# Altium footprint library huan_basic.PcbLib: 138 footprints (part 3 of 9)
Each footprint in its own frame and in the unit in brackets; x right, y up, seen from the top. Pads: shape width x height; smd on the part's side, far side on the other; paste and mask are expansions set on the pad; w line width, h text height; cw(c..) or ccw(c..) is an arc to the next point about the centre after c.
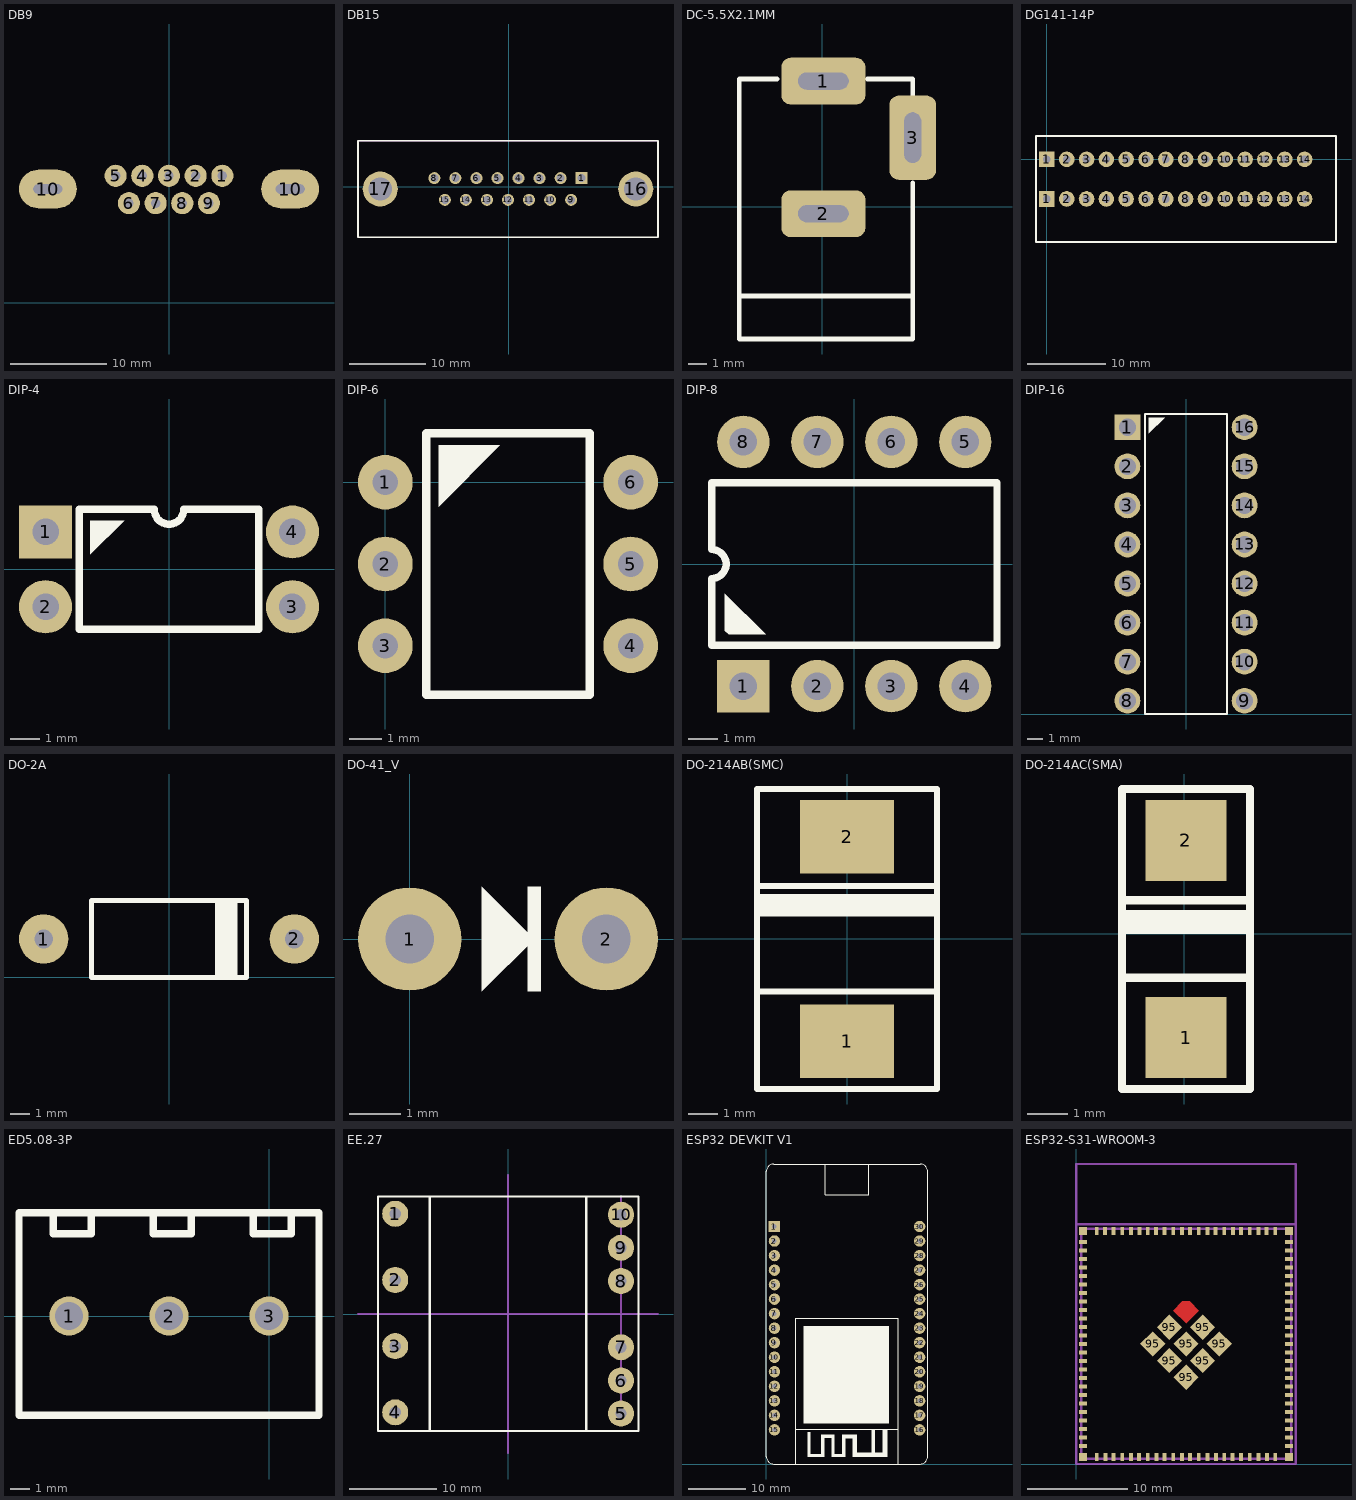
[diagram p2: the footprints below, top view; thin cyan lines are the x and y axes]

## DB9 [mm]
pads (11):
  round 2.3 hole 0.97: 1(5.537,13.183) 2(2.767,13.183) 3(-0.003,13.183) 4(-2.773,13.183) 5(-5.543,13.183) 6(-4.158,10.343) 7(-1.388,10.343) 8(1.382,10.343) 9(4.152,10.343)
  oval 6x4 hole 1 slot 3 at 0 deg: 10(-12.573,11.811) 10(12.573,11.811)
3D body "DB9 - 203-09SCKKBE.STEP": height 12.75, standoff -4.25, extent -15.405,-4.01 15.405,14.54

## DB15 [mm]
pads (17):
  rect 1.56x1.56 hole 1.04: 1(9.525,1.143)
  round 1.56 hole 1.04: 2(6.785,1.143) 3(4.035,1.143) 4(1.295,1.143) 5(-1.445,1.143) 6(-4.185,1.143) 7(-6.935,1.143) 8(-9.675,1.143) 9(8.155,-1.697) 10(5.415,-1.697) 11(2.665,-1.697) 12(-0.075,-1.697) 13(-2.815,-1.697) 14(-5.565,-1.697) 15(-8.305,-1.697)
  round 4.575 hole 3.05: 16(16.585,-0.277) 17(-16.735,-0.277)
Top Overlay:
  lines w0.2: -19.635,-6.552 -19.635,5.998 19.485,5.998 19.485,-6.552 -19.635,-6.552
Mechanical 15:
  lines w0.1: -19.635,-6.552 -19.635,5.998 19.485,5.998 19.485,-6.552 -19.635,-6.552
3D body "DB15_F.STEP": height 12.3, standoff -3.42, extent -19.98,-6.777 20.02,6.223

## DC-5.5X2.1MM [mm]
pads (3):
  rrect40% 4.5x2.5 hole 2.7 slot 0.9 at 90 deg: 1(0.051,6.706) 2(0.051,-0.381)
  rrect40% 2.5x4.5 hole 2.7 slot 0.9 at 0 deg: 3(4.826,3.683)
Top Overlay:
  lines w0.254: -4.447,-4.773 4.826,-4.773 ; -2.413,6.823 -4.447,6.823 -4.447,-7.077 4.826,-7.077 4.826,1.27 ; 2.413,6.823 4.826,6.823 4.826,5.842
3D body "PC-GK2.1--3DModel-STEP-56544.STEP": height 11.1, standoff -2.9, extent -4.447,-7.077 4.953,6.823

## DG141-14P [mm]
pads (28):
  rect 2x2 hole 0.98: 1(0,-5.08) 1(0,0)
  round 2 hole 0.98: 2(2.54,-5.08) 2(2.54,0) 3(5.08,-5.08) 3(5.08,0) 4(7.62,-5.08) 4(7.62,0) 5(10.16,-5.08) 5(10.16,0) 6(12.7,-5.08) 6(12.7,0) 7(15.24,-5.08) 7(15.24,0) 8(17.78,-5.08) 8(17.78,0) 9(20.32,-5.08) 9(20.32,0) 10(22.86,-5.08) 10(22.86,0) 11(25.4,-5.08) 11(25.4,0) 12(27.94,-5.08) 12(27.94,0) 13(30.48,-5.08) 13(30.48,0) 14(33.02,-5.08) 14(33.02,0)
Top Overlay:
  lines w0.254: -1.397,-10.6 37.05,-10.6 37.05,3 -1.397,3 -1.397,-10.6
3D body "DG141R-2.54-10.SLDPRT": height 12.6, standoff -3.5, extent 9.21,-10.63 37.05,2.97
3D body "DG141R-2.54-4.SLDPRT": height 12.6, standoff -3.5, extent -0.9,-10.6 11.7,3

## DIP-4 [mm]
pads (4):
  rect 1.8x1.8 hole 0.9: 1(-4.191,1.27)
  round 1.8 hole 0.9: 2(-4.191,-1.27) 3(4.191,-1.27) 4(4.191,1.27)
Top Overlay:
  region: -2.667,1.651 -1.524,1.651 -2.667,0.508
  lines w0.254: -3.048,-2.032 3.048,-2.032 3.048,2.032 0.5,2.032 cw(c0,2.032) -0.5,2.032 -3.048,2.032 -3.048,-2.032
3D body "pc817 dip6.step": height 4.3, standoff -2.7, extent -3.94,-2.295 3.94,2.295

## DIP-6 [mm]
pads (6):
  round 1.7 hole 0.8: 1(0,0) 2(0,-2.54) 3(0,-5.08) 4(7.62,-5.08) 5(7.62,-2.54) 6(7.62,0)
Top Overlay:
  region: 1.651,1.143 3.556,1.143 1.651,-0.762
  lines w0.254: 1.27,-6.604 6.35,-6.604 6.35,1.524 1.27,1.524 1.27,-6.604
3D body "DIP 6 7_62.stp": height 4, standoff -3.25, extent -0.15,-6.94 7.77,1.86

## DIP-8 [mm]
pads (8):
  rect 1.8x1.8 hole 0.94: 1(-3.81,-4.191)
  round 1.8 hole 0.94: 2(-1.27,-4.191) 3(1.27,-4.191) 4(3.81,-4.191) 5(3.81,4.191) 6(1.27,4.191) 7(-1.27,4.191) 8(-3.81,4.191)
Top Overlay:
  region: -4.445,-1.016 -3.048,-2.413 -4.318,-2.413 -4.445,-2.286
  lines w0.254: -4.9,-2.794 -4.826,-2.794 4.9,-2.794 4.9,0 4.9,2.794 -4.826,2.794 -4.9,2.794 -4.9,0.5 cw(c-4.9,0) -4.9,-0.5 -4.9,-2.794
3D body "DIP-8 N.step": height 4.1, standoff -3.25, extent -4.9,-4.568 4.9,4.568

## DIP-16 [mil]
pads (16):
  rect 66x66 hole 44: 1(-150,735)
  round 66 hole 44: 2(-150,635) 3(-150,535) 4(-150,435) 5(-150,335) 6(-150,235) 7(-150,135) 8(-150,35) 9(150,35) 10(150,135) 11(150,235) 12(150,335) 13(150,435) 14(150,535) 15(150,635) 16(150,735)
Top Overlay:
  region: -95,760 -55,760 -95,720
  lines w5.98: -105,769 -105,1 105,1 105,769
  lines w6: -105,769 105,769
3D body "DIP-16 N.step": height 161.42, standoff -127.98, extent -179.85,-9.49 179.85,779.49

## DO-2A [mm]
pads (2):
  round 2.5 hole 0.94: 1(-6.35,1.95) 2(6.35,1.95)
Top Overlay:
  rectangle: 2.325,0 3.478,3.9
  lines w0.254: -3.937,0 -3.937,3.9 0,3.9 3.937,3.9 3.937,0 0,0 -3.937,0
3D body "D2A_Min_500mil_rev1.0.STEP": height 4.9, standoff -2.6, extent -6.84,0 6.84,3.9

## DO-41_V [mm]
pads (2):
  round 2 hole 0.94: 1(0,0) 2(3.81,0)
Top Overlay:
  rectangle: 2.286,-1.016 2.54,1.016
  region: 1.397,1.016 1.397,-1.016 2.413,0
3D body "DO-41_Max_size_150mil_rev1.0.STEP": height 9.38, standoff -2.6, extent -1.355,-1.355 4.242,1.355

## DO-214AB(SMC) [mm]
pads (2):
  rect 3.2x2.5 smd: 1(0,-3.462) 2(0,3.462)
Top Overlay:
  rectangle: -3.048,0.762 3.048,1.524
  lines w0.2: -3.048,-1.776 3.048,-1.776 ; -3.048,-0.953 -3.048,5.08 0,5.08 3.048,5.08 3.048,-0.953 ; -3.048,0.952 -3.048,-5.08 0,-5.08 3.048,-5.08 3.048,0.952 ; -3.048,1.799 3.048,1.799
3D body "SMC (DO-214AB).STEP": height 2.5, standoff 0, extent -3.1,-4 3.1,4

## DO-214AC(SMA) [mm]
pads (2):
  rect 2x2 smd: 1(0.049,-2.546) 2(0.049,2.292)
Top Overlay:
  rectangle: -1.524,0 1.622,0.588
  lines w0.2: -1.524,-1.079 0.049,-1.079 1.622,-1.079 ; -1.524,0.826 0.049,0.826 1.622,0.826 ; -1.524,-3.81 1.622,-3.81 1.622,-2.032 1.622,-0.127 1.622,1.778 1.622,3.556 -1.524,3.556 -1.524,1.778 -1.524,-0.127 -1.524,-2.032 -1.524,-3.81
3D body "DO-214AC.stp": height 2.9, standoff 0, extent -1.426,-2.927 1.524,2.673

## ED5.08-3P [mm]
pads (3):
  round 2 hole 1.4: 1(-10.16,0) 2(-5.08,0) 3(0,0)
Top Overlay:
  lines w0.381: -10.968,5.048 -10.968,4.191 -9.033,4.191 -9.033,5.048 ; -5.888,5.048 -5.888,4.191 -3.953,4.191 -3.953,5.048 ; -0.808,5.048 -0.808,4.191 1.127,4.191 1.127,5.048 ; -12.7,-5.048 -12.7,5.252 2.54,5.252 2.54,-5.048 -12.7,-5.048
3D body "KF128-5.08_3P.STEP": height 14.15, standoff -3.8, extent -12.613,-5.048 -6.933,5.252
3D body "KF128-5.08_3P.STEP": height 14.15, standoff -3.8, extent -7.534,-5.048 -1.854,5.252
3D body "KF128-5.08_3P.STEP": height 14.15, standoff -3.8, extent -2.454,-5.048 3.226,5.252

## EE.27 [mm]
pads (11):
  round 3 hole 1.3: 1(-12.986,11.538) 2(-12.986,3.918) 3(-12.986,-3.702) 4(-12.986,-11.322) 5(13.014,-11.462) 5(13.014,-11.462) 6(13.014,-7.664) 7(13.014,-3.832) 8(13.014,3.798) 9(13.014,7.63) 10(13.014,11.428)
Top Overlay:
  lines w0.254: -9,-13.462 -9,13.538 ; 9,-13.462 9,13.538 ; -14.986,-13.462 15.014,-13.462 15.014,13.538 -14.986,13.538 -14.986,-13.462
Mechanical 15:
  lines w0.254: -17.272,0 17.272,0 ; 0,-16.002 0,16.002 ; 13.014,-11.462 13.014,13.538
3D body: height 5, standoff 0.4, extent -14.986,-13.462 15.014,13.538
3D body: height 26, standoff 20, extent -9,-13.462 9,13.538
3D body: height 24, standoff 0.5, extent -9,-13.462 9,13.538
3D body: height 20, standoff 0.5, extent -9.655,-9.655 9.655,9.655

## ESP32 DEVKIT V1 [mm]
pads (30):
  rect 2x2 hole 0.8: 1(1.41,41.529)
  round 2 hole 0.8: 2(1.41,38.989) 3(1.41,36.449) 4(1.41,33.909) 5(1.41,31.369) 6(1.41,28.829) 7(1.41,26.289) 8(1.41,23.749) 9(1.41,21.209) 10(1.41,18.669) 11(1.41,16.129) 12(1.41,13.589) 13(1.41,11.049) 14(1.41,8.509) 15(1.41,5.969) 16(26.797,5.969) 17(26.797,8.509) 18(26.797,11.049) 19(26.797,13.589) 20(26.797,16.129) 21(26.797,18.669) 22(26.797,21.209) 23(26.797,23.749) 24(26.797,26.289) 25(26.797,28.829) 26(26.797,31.369) 27(26.797,33.909) 28(26.797,36.449) 29(26.797,38.989) 30(26.797,41.529)
Top Overlay:
  region: 21.195,6.069 20.306,6.069 20.306,1.243 21.195,1.243
  region: 19.036,6.069 18.401,6.069 18.401,1.878 19.036,1.878
  region: 20.433,2.005 15.099,2.005 15.099,1.243 20.433,1.243
  region: 15.861,5.18 15.099,5.18 15.099,1.751 15.861,1.751
  region: 15.48,5.18 13.194,5.18 13.194,4.418 15.48,4.418
  region: 13.829,5.18 13.194,5.18 13.194,1.243 13.829,1.243
  region: 13.448,1.751 11.416,1.751 11.416,1.243 13.448,1.243
  region: 11.924,5.18 11.416,5.18 11.416,1.497 11.924,1.497
  region: 11.543,5.18 9.511,5.18 9.511,4.545 11.543,4.545
  region: 10.146,4.926 9.511,4.926 9.511,1.243 10.146,1.243
  region: 9.638,1.751 7.225,1.751 7.225,1.243 9.638,1.243
  region: 7.733,5.561 7.225,5.561 7.225,1.497 7.733,1.497
  rectangle: 6.477,7.112 21.463,24.13
  lines w0.2: 5.193,6.069 23.1,6.069 ; 10.287,52.324 10.287,47.117 17.907,47.117 17.907,52.324 ; 0.003,1.27 ccw(c1.273,1.27) 1.273,0 26.927,0 ccw(c26.927,1.27) 28.197,1.27 28.197,51.188 ccw(c26.927,51.188) 26.927,52.458 13.846,52.458 1.273,52.458 ccw(c1.273,51.188) 0.003,51.188 0.003,1.27 ; 5.1,0 23.1,0 23.1,25.5 5.1,25.5 5.1,0
3D body "ESP32-DEVKIT-V1--3DModel-STEP-269445.STEP": height 12.05, standoff -1, extent 0,-0.019 28.2,52.431
3D body "Header_Female_single_15.STEP": height 8, standoff 0, extent 25.57,4.65 28.07,42.75
3D body "Header_Female_single_15.STEP": height 8, standoff 0, extent 0.183,4.65 2.683,42.75

## ESP32-S31-WROOM-3 [mm]
pads (107):
  rect 0.8x0.4 smd: 1(0.7,22.2) 2(0.7,21.35) 3(0.7,20.5) 4(0.7,19.65) 5(0.7,18.8) 6(0.7,17.95) 7(0.7,17.1) 8(0.7,16.25) 9(0.7,15.4) 10(0.7,14.55) 11(0.7,13.7) 12(0.7,12.85) 13(0.7,12) 14(0.7,11.15) 15(0.7,10.3) 16(0.7,9.45) 17(0.7,8.6) 18(0.7,7.75) 19(0.7,6.9) 20(0.7,6.05) 21(0.7,5.2) 22(0.7,4.35) 23(0.7,3.5) 24(0.7,2.65) 25(0.7,1.8) 48(21.3,1.8) 49(21.3,2.65) 50(21.3,3.5) 51(21.3,4.35) 52(21.3,5.2) 53(21.3,6.05) 54(21.3,6.9) 55(21.3,7.75) 56(21.3,8.6) 57(21.3,9.45) 58(21.3,10.3) 59(21.3,11.15) 60(21.3,12) 61(21.3,12.85) 62(21.3,13.7) 63(21.3,14.55) 64(21.3,15.4) 65(21.3,16.25) 66(21.3,17.1) 67(21.3,17.95) 68(21.3,18.8) 69(21.3,19.65) 70(21.3,20.5) 71(21.3,21.35) 72(21.3,22.2)
  rect 0.4x0.8 smd: 26(2.075,0.7) 27(2.925,0.7) 28(3.775,0.7) 29(4.625,0.7) 30(5.475,0.7) 31(6.325,0.7) 32(7.175,0.7) 33(8.025,0.7) 34(8.875,0.7) 35(9.725,0.7) 36(10.575,0.7) 37(11.425,0.7) 38(12.275,0.7) 39(13.125,0.7) 40(13.975,0.7) 41(14.825,0.7) 42(15.675,0.7) 43(16.525,0.7) 44(17.375,0.7) 45(18.225,0.7) 46(19.075,0.7) 47(19.925,0.7) 73(19.925,23.3) 74(19.075,23.3) 75(18.225,23.3) 76(17.375,23.3) 77(16.525,23.3) 78(15.675,23.3) 79(14.825,23.3) 80(13.975,23.3) 81(13.125,23.3) 82(12.275,23.3) 83(11.425,23.3) 84(10.575,23.3) 85(9.725,23.3) 86(8.875,23.3) 87(8.025,23.3) 88(7.175,23.3) 89(6.325,23.3) 90(5.475,23.3) 91(4.625,23.3) 92(3.775,23.3) 93(2.925,23.3) 94(2.075,23.3)
  rect 1.8x1.8 smd rot 135: 95(7.677,12.008) 95(9.338,10.346) 95(9.338,13.67) 95(11,8.685) 95(11,12.008) 95(12.662,10.346)
  round 0.025 smd paste-2539.97 mask-2539.97: 95(11,15.331)
  rect 1.8x1.8 smd rot 45: 95(12.662,13.67) 95(14.323,12.008)
  rect 0.8x0.8 smd: 96(0.7,0.7) 97(21.3,0.7) 98(21.3,23.3) 99(0.7,23.3)
Top Layer:
  region: 9.727,15.331 10.646,16.251 11.354,16.251 12.273,15.331 11,14.059
Top Paste:
  region: 9.727,15.331 10.646,16.251 11.354,16.251 12.273,15.331 11,14.059
Top Solder:
  region: 9.655,15.403 9.641,15.389 9.626,15.352 9.626,15.311 9.641,15.274 9.655,15.26 10.928,13.987 10.942,13.972 10.98,13.957 11.02,13.957 11.058,13.972 11.072,13.987 12.345,15.26 12.359,15.274 12.374,15.311 12.374,15.352 12.359,15.389 12.345,15.403 11.425,16.322 11.418,16.33 11.402,16.341 11.383,16.348 11.364,16.352 11.354,16.352 10.646,16.352 10.636,16.352 10.617,16.348 10.598,16.341 10.582,16.33 10.575,16.322
Mechanical 15:
  lines w0.25: 0,24 22,24 ; 10.526,24 11,24 ; 21.508,10.835 21.508,12.008 ; 0,0 0,30 22,30 22,0 0,0 ; 0.508,0.508 0.508,23.508 21.508,23.508 21.508,0.508 0.508,0.508
3D body: height 1, standoff 0, extent 0,0 22,30
3D body: height 3, standoff 0.5, extent 0.508,0.508 21.508,23.508
3D body: height 3.02, standoff 0.1, extent 1.274,1.147 1.774,1.647